# Altium footprint library KM_ALTIUM.PcbLib: 265 footprints (part 13 of 17)
Each footprint in its own frame and in the unit in brackets; x right, y up, seen from the top. Pads: shape width x height; smd on the part's side, far side on the other; paste and mask are expansions set on the pad; w line width, h text height; cw(c..) or ccw(c..) is an arc to the next point about the centre after c.
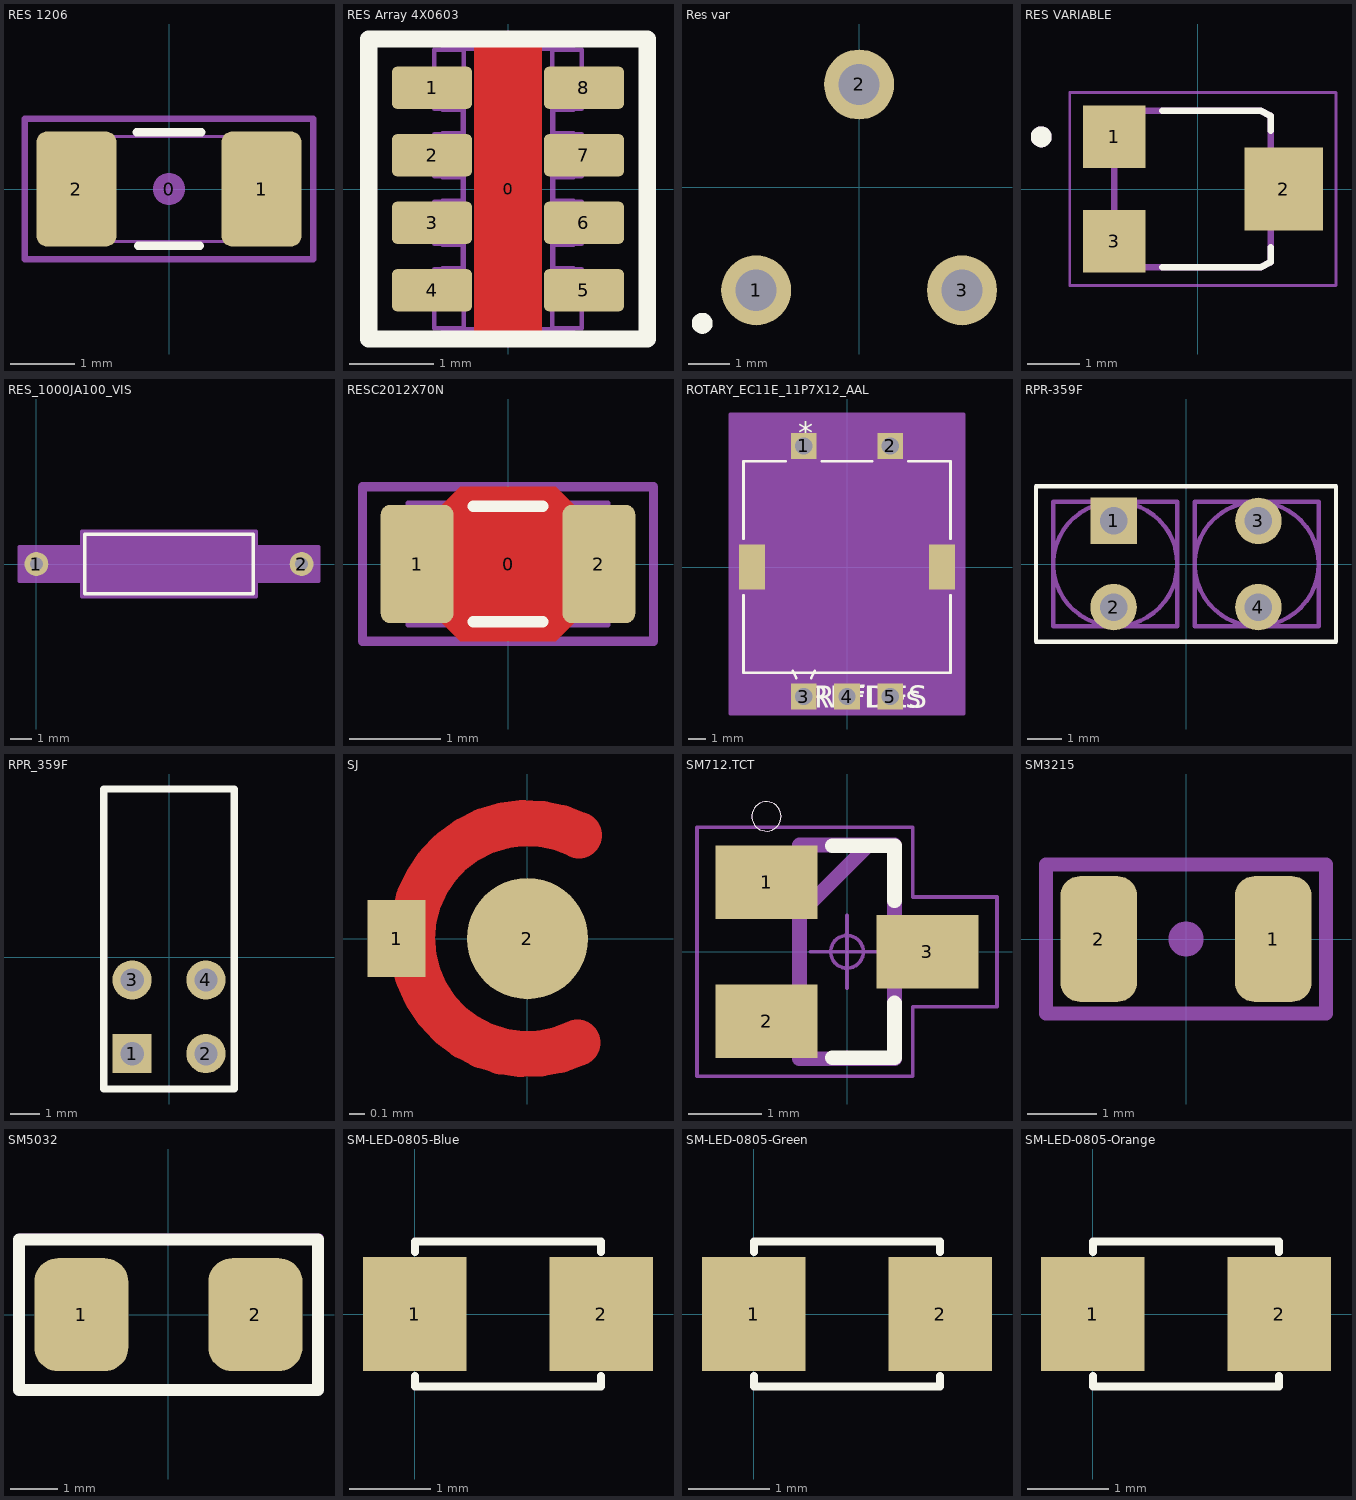
[diagram p12: the footprints below, top view; thin cyan lines are the x and y axes]

## RES 1206 [mm]
pads (3):
  round 0.508 on Mech15: 0(0,0)
  rrect25% 1.25x1.8 smd: 1(1.45,0) 2(-1.45,0)
Top Overlay:
  lines w0.127: -0.508,0.889 0.508,0.889 ; -0.483,-0.889 0.483,-0.889
Mechanical 13:
  lines w0.05: -1.025,0.824 1.025,0.824 -1.025,0.824 ; -1.625,-0.825 -1.625,0.825 -1.025,0.825 -1.025,-0.825 -1.625,-0.825 ; -1.025,-0.824 1.025,-0.824 -1.025,-0.824 ; 1.025,-0.825 1.025,0.825 1.625,0.825 1.625,-0.825 1.025,-0.825
Mechanical 15:
  lines w0.1: -2.261,-1.1 2.261,-1.1 2.261,1.1 -2.261,1.1 -2.261,-1.1
3D body "RES 1206 (3216 metric).STEP": height 0.69, standoff -0.01, extent -1.625,-0.825 1.625,0.825

## RES Array 4X0603 [mm]
pads (9):
  round 0.254 on Mech15: 0(0,0)
  rrect25% 0.95x0.5 smd: 1(-0.9,1.2) 2(-0.9,0.4) 3(-0.9,-0.4) 4(-0.9,-1.2) 5(0.9,-1.2) 6(0.9,-0.4) 7(0.9,0.4) 8(0.9,1.2)
Top Layer:
  pour cut-out: -0.4,1.7 0.4,1.7 0.4,-1.7 -0.4,-1.7
Top Overlay:
  lines w0.203: -1.651,-1.778 1.651,-1.778 1.651,1.778 -1.651,1.778 -1.651,-1.778
Top Solder:
  region: 1.3,1.2 0.5,1.2 0.5,-1.2 1.3,-1.2
  rectangle: -1.3,-1.2 -0.5,1.2
Mechanical 13:
  lines w0.05: -0.775,-1.65 -0.775,-1.675 0.775,-1.675 0.775,-1.65 ; -0.775,-0.95 -0.775,-0.938 -0.537,-0.938 -0.537,-0.663 -0.775,-0.663 -0.775,-0.65 ; -0.775,-0.15 -0.775,-0.138 -0.537,-0.138 -0.537,0.138 -0.775,0.138 -0.775,0.15 ; -0.775,0.65 -0.775,0.663 -0.537,0.663 -0.537,0.938 -0.775,0.938 -0.775,0.95 ; -0.775,1.65 -0.775,1.675 0.775,1.675 0.775,1.65 ; -0.525,-1.65 -0.875,-1.65 -0.875,-0.95 -0.525,-0.95 ; -0.525,-0.65 -0.875,-0.65 -0.875,-0.15 -0.525,-0.15 ; -0.525,0.15 -0.875,0.15 -0.875,0.65 -0.525,0.65 ; -0.525,0.95 -0.875,0.95 -0.875,1.65 -0.525,1.65 ; 0.525,-1.65 0.875,-1.65 0.875,-0.95 0.525,-0.95 ; 0.525,-0.65 0.875,-0.65 0.875,-0.15 0.525,-0.15 ; 0.525,0.15 0.875,0.15 0.875,0.65 0.525,0.65 ; 0.525,0.95 0.875,0.95 0.875,1.65 0.525,1.65 ; 0.775,-0.95 0.775,-0.938 0.537,-0.938 0.537,-0.663 0.775,-0.663 0.775,-0.65 ; 0.775,-0.15 0.775,-0.138 0.537,-0.138 0.537,0.138 0.775,0.138 0.775,0.15 ; 0.775,0.65 0.775,0.663 0.537,0.663 0.537,0.938 0.775,0.938 0.775,0.95 ; -0.525,-1.663 -0.525,1.663 0.525,1.663 0.525,-1.663 -0.525,-1.663
Mechanical 15:
  lines w0.076: -1.651,-1.778 -1.651,1.778 1.651,1.778 1.651,-1.778 -1.651,-1.778
3D body "RESCAXS50P32X16X70-8N.STEP": height 0.7, standoff 0, extent -0.875,-1.675 0.875,1.675

## Res var [mm] "RM-065"
pads (3):
  round 1.7 hole 1: 1(-2.5,-2.5) 2(0,2.5) 3(2.5,-2.5)
Top Overlay:
  circle w0.254: c-3.81,-3.302 r0.127
3D body "Poti_10kohm.stp": height 10.44, standoff -1.39, extent -3.4,-3.633 3.4,3.25

## RES VARIABLE [mm] "3X3"
height 1.8
pads (3):
  rect 1.2x1.2 smd: 1(-1.6,1) 3(-1.6,-1)
  rect 1.5x1.6 smd: 2(1.65,0)
Top Overlay:
  circle w0.2: c-3,1 r0.1
  lines w0.127: -0.68,-1.5 1.2,-1.5 1.4,-1.4 1.4,-1.12 ; -0.68,1.5 1.2,1.5 1.4,1.4 1.4,1.12
Mechanical 13:
  circle w0.2: c-3,1 r0.1
  lines w0.127: -1.6,-1.5 -1.6,1.5 1.2,1.5 1.4,1.4 1.4,-1.4 1.2,-1.5 -1.6,-1.5
Mechanical 15:
  lines w0.05: -2.45,-1.85 -2.45,1.85 2.65,1.85 2.65,-1.85 -2.45,-1.85
3D body "EVM-3E.STEP": height 1.62, standoff 0, extent -1.95,-1.55 1.85,1.55

## RES_1000JA100_VIS [mil]
pads (2):
  round 43 hole 23 paste-21.5 mask+0: 1(0,0) 2(479,0)
Top Overlay:
  lines w6: 87,-54 87,54 392,54 392,-54 87,-54
  text ".Designator" at 102,-25 h50
Mechanical 13:
  lines w1: 0,0 92,0 ; 387,0 479,0 ; 92,-49 92,49 387,49 387,-49 92,-49
  text ".Designator" at 102,-25 h50
Mechanical 15:
  region: 82,-31.5 -31.5,-31.5 -31.5,31.5 82,31.5 82,59 397,59 397,31.5 510.5,31.5 510.5,-31.5 397,-31.5 397,-59 82,-59
  lines w6: -31.5,-31.5 82,-31.5 82,-59 397,-59 397,-31.5 510.5,-31.5 510.5,31.5 397,31.5 397,59 82,59 82,31.5 -31.5,31.5 -31.5,-31.5
3D body "RES_1000JA100_VIS.step": height 98.02, standoff -100, extent -6.5,-48.64 485.51,48.64

## RESC2012X70N [mm] "Chip Resistor, Body 2.0x1.2mm, EIA 0805, IPC Medium Density"
height 0.7
pads (3):
  round 0.254 on Mech15: 0(0,0)
  rrect25% 0.8x1.3 smd: 1(-1,0) 2(1,0)
Top Layer:
  pour cut-out: -0.725,0.65 -0.525,0.85 0.525,0.85 0.725,0.65 0.725,-0.65 0.525,-0.85 -0.525,-0.85 -0.725,-0.65
Top Overlay:
  lines w0.127: -0.381,-0.635 0.381,-0.635 ; -0.381,0.635 0.381,0.635
Mechanical 13:
  lines w0.05: 0.6,-0.674 -0.6,-0.674 ; -0.6,-0.675 -0.6,0.675 -1.1,0.675 -1.1,-0.675 -0.6,-0.675 ; -0.6,-0.674 0.6,-0.674 ; 0.6,-0.675 0.6,0.675 ; 0.6,-0.675 1.1,-0.675 1.1,0.675 0.6,0.675 ; 0.6,0.674 -0.6,0.674 0.6,0.674
Mechanical 15:
  lines w0.1: -1.6,-0.85 1.6,-0.85 1.6,0.85 -1.6,0.85 -1.6,-0.85
3D body "RES 0805 (2012 metric).STEP": height 0.69, standoff -0.01, extent -1.1,-0.675 1.1,0.675

## ROTARY_EC11E_11P7X12_AAL [mil]
pads (7):
  rect 59x59 / inner round 60 / far side rect 59x59 hole 39 paste-29.5 mask+0: 1(-98.43,275.81) 2(98.43,275.81) 3(-98.43,-295.06) 4(0,-295.06) 5(98.43,-295.06)
  rect 59x102 smd paste-51 mask-51: ""(-216.54,0.22) ""(216.54,0.22)
Top Overlay:
  lines w6: -235.5,-63.88 -235.5,-241 235.5,-241 235.5,-63.88 ; -235.5,64.32 -235.5,241 -139.9,241 ; -123.43,-236 -115.2,-252.46 ; -81.65,-252.46 -73.43,-236 ; -56.95,241 56.95,241 ; 139.9,241 235.5,241 235.5,64.32
  text "REFDES" at -87.5,-320.06 h50
  text "RefDes" at -75,-320.06 h50
  text "*" at -110.93,280.81 h50
Mechanical 13:
  lines w1: -230.5,-48.99 -246.25,-48.99 -246.25,49.43 -230.5,49.43 ; -123.43,-236 -98.43,-286 -73.43,-236 ; 230.5,-48.99 246.25,-48.99 246.25,49.43 230.5,49.43 ; -230.5,-236 -230.5,236 230.5,236 230.5,-236 -230.5,-236
  text "RefDes2" at -87.5,-320.06 h50
  text "*" at -110.93,200.81 h50
Mechanical 15:
  region: -266.25,348.44 -266.25,-334.56 266.25,-334.56 266.25,348.44
  lines w6: -266.25,-334.56 -266.25,348.44 266.25,348.44 266.25,-334.56 -266.25,-334.56
3D body "Ël  h.STEP": height 842.52, standoff -145.67, extent -242.13,-295.28 242.12,295.27

## RPR-359F [mm] "IR led"
pads (4):
  rect 1.35x1.35 hole 0.8: 1(-2.1,1.25)
  round 1.35 hole 0.8: 2(-2.1,-1.25) 3(2.1,1.25) 4(2.1,-1.25)
Top Overlay:
  lines w0.127: -4.35,-2.25 -4.35,2.25 4.35,2.25 4.35,-2.25 -4.35,-2.25
Mechanical 13:
  circle w0.127: c2.05,0 r1.8
  circle w0.127: c-2.05,0 r1.8
  lines w0.127: -3.85,-1.8 -3.85,1.8 -0.25,1.8 -0.25,-1.8 -3.85,-1.8 ; 0.25,-1.8 3.85,-1.8 3.85,1.8 0.25,1.8 0.25,-1.8
3D body "RPR-359F.stp": height 5.8, standoff -14, extent -4.35,-2.25 4.35,2.25

## RPR_359F [mm]
pads (4):
  rect 1.35x1.35 hole 0.8: 1(-1.27,-3.318)
  round 1.35 hole 0.8: 2(1.27,-3.318) 3(-1.27,-0.778) 4(1.27,-0.778)
Top Overlay:
  lines w0.254: -2.25,-4.536 -2.25,5.8 2.25,5.8 2.25,-3.6 2.25,-4.536 -2.25,-4.536
3D body "RPR-359F v1.step": height 2.35, standoff -8.75, extent -2.25,-3.6 2.25,5.8

## SJ [mil]
pads (2):
  rect 15x20 smd: 1(-34,0)
  round 31.5 smd: 2(0,0)
Top Layer:
  lines w12: 12.98,-27.05 cw(c0,0) 13.42,26.83
Top Solder:
  region: 16.12,-32.27 14.14,-33.25 9.95,-34.69 5.62,-35.59 1.21,-35.93 -0.99,-35.82 -3.38,-35.75 -8.11,-35.01 -12.71,-33.68 -17.1,-31.78 -19.16,-30.56 -22.92,-27.91 -28.88,-20.91 -32.89,-12.63 -34.69,-3.61 -34.44,0.98 -34.68,5.05 -33.11,13.05 -29.58,20.41 -24.33,26.64 -21,29 -16.94,31.71 -7.71,34.93 2.04,35.73 11.67,34.06 16.12,32.04 20.2,29.48 26.82,22.48 31.49,14.04 33.89,4.71 33.89,-4.93 31.49,-14.27 26.82,-22.7 20.2,-29.71

## SM712.TCT [mm]
pads (3):
  rect 1.4x1 smd paste-2 mask+0: 1(-1.1,0.95) 2(-1.1,-0.95) 3(1.1,0)
Top Overlay:
  circle w0: c-1.1,1.85 r0.2
  lines w0.2: -0.2,-1.45 0.65,-1.45 0.65,-0.7 ; -0.2,1.45 0.65,1.45 0.65,0.7
Top Paste:
  region: 1.69,-0.38 0.51,-0.38 0.51,0.38 1.69,0.38
  region: -0.51,-1.33 -1.69,-1.33 -1.69,-0.57 -0.51,-0.57
  region: -0.51,0.57 -1.69,0.57 -1.69,1.33 -0.51,1.33
  lines w0.05: -1.7,-1.25 ccw(c-1.6,-1.25) -1.6,-1.35 -0.6,-1.35 ccw(c-0.6,-1.25) -0.5,-1.25 -0.5,-0.65 ccw(c-0.6,-0.65) -0.6,-0.55 -1.6,-0.55 ccw(c-1.6,-0.65) -1.7,-0.65 -1.7,-1.25 ; -1.7,0.65 ccw(c-1.6,0.65) -1.6,0.55 -0.6,0.55 ccw(c-0.6,0.65) -0.5,0.65 -0.5,1.25 ccw(c-0.6,1.25) -0.6,1.35 -1.6,1.35 ccw(c-1.6,1.25) -1.7,1.25 -1.7,0.65 ; 0.5,-0.3 ccw(c0.6,-0.3) 0.6,-0.4 1.6,-0.4 ccw(c1.6,-0.3) 1.7,-0.3 1.7,0.3 ccw(c1.6,0.3) 1.6,0.4 0.6,0.4 ccw(c0.6,0.3) 0.5,0.3 0.5,-0.3
Mechanical 13:
  circle w0: c-1.1,1.85 r0.2
  lines w0.2: -0.65,0.51 0.3,1.46 ; -0.65,-1.46 -0.65,1.46 0.65,1.46 0.65,-1.46 -0.65,-1.46
Mechanical 15:
  circle w0.05: c0,0 r0.224
  lines w0.05: -0.5,0 0.5,0 ; 0,-0.5 0,0.5 ; -2.05,-1.7 0.9,-1.7 0.9,-0.75 2.05,-0.75 2.05,0.75 0.9,0.75 0.9,1.7 -2.05,1.7 -2.05,-1.7
3D body "step_temp.STEP": height 1.2, standoff 0, extent -1.185,-1.45 1.185,1.45

## SM3215 [mm]
pads (3):
  rrect50% 1.1x1.8 smd: 1(1.25,0) 2(-1.25,0)
  round 0.508 on Mech15: ""(0,0)
Mechanical 3:
  lines w0.203: -2.007,-1.067 2.007,-1.067 2.007,1.067 -2.007,1.067 -2.007,-1.067
3D body "User Library-Crystal FC-135.STEP": height 0.8, standoff 0, extent -1.6,-0.75 1.6,0.75

## SM5032 [mm]
pads (2):
  rrect50% 2x2.4 smd: 1(-1.85,0) 2(1.85,0)
Top Overlay:
  lines w0.254: -3.175,-1.6 -3.175,1.6 3.175,1.6 3.175,-1.6 -3.175,-1.6
Mechanical 3:
  lines w0.203: -3.15,-1.575 3.2,-1.575 3.2,1.626 -3.15,1.626 -3.15,-1.575
3D body "User Library-ABM3-1.STEP": height 1.3, standoff 0, extent -2.475,-1.6 2.525,1.6

## SM-LED-0805-Blue [mil]
pads (2):
  rect 50x55 smd: 1(0,0) 2(90,0)
Top Overlay:
  lines w4: 0,-30 0,-35 90,-35 90,-30 ; 0,30 0,35 90,35 90,30
3D body "User Library-led_0805-blue.step": height 43.31, standoff 0, extent 5.24,-24.6 84.77,24.61

## SM-LED-0805-Green [mil]
pads (2):
  rect 50x55 smd: 1(0,0) 2(90,0)
Top Overlay:
  lines w4: 0,-30 0,-35 90,-35 90,-30 ; 0,30 0,35 90,35 90,30
3D body "User Library-led_0805-Green.step": height 43.31, standoff 0, extent 5.24,-24.6 84.77,24.61

## SM-LED-0805-Orange [mil]
pads (2):
  rect 50x55 smd: 1(0,0) 2(90,0)
Top Overlay:
  lines w4: 0,-30 0,-35 90,-35 90,-30 ; 0,30 0,35 90,35 90,30
3D body "User Library-led_0805-orange.step": height 43.31, standoff 0, extent 5.24,-24.59 84.77,24.62